# Altium footprint library amirlib.PcbLib: 456 footprints (part 3 of 29)
Each footprint in its own frame and in the unit in brackets; x right, y up, seen from the top. Pads: shape width x height; smd on the part's side, far side on the other; paste and mask are expansions set on the pad; w line width, h text height; cw(c..) or ccw(c..) is an arc to the next point about the centre after c.
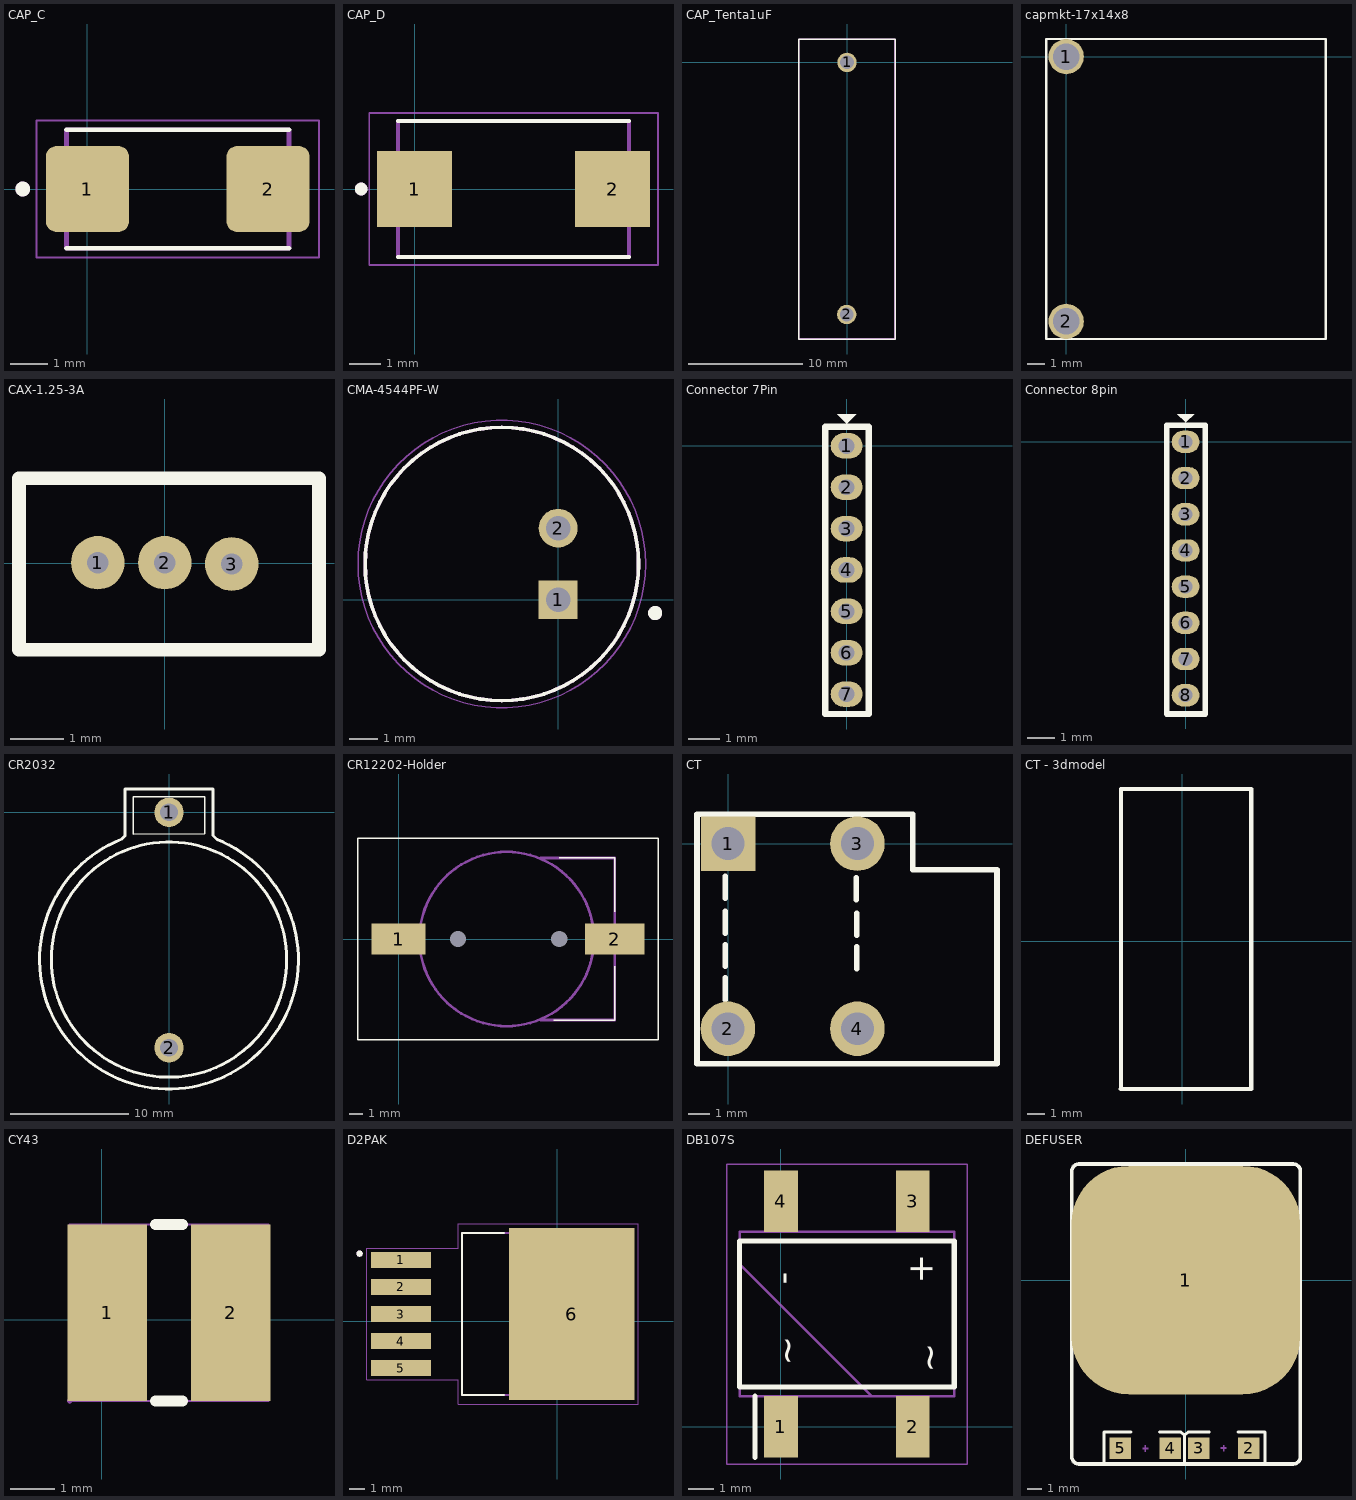
[diagram p2: the footprints below, top view; thin cyan lines are the x and y axes]

## CAP_C [mm]
pads (2):
  rrect25% 2.24x2.32 smd: 1(0,0) 2(4.87,0)
Top Overlay:
  circle w0.2: c-1.745,0 r0.1
  lines w0.127: -0.565,-1.6 5.435,-1.6 ; -0.565,1.6 5.435,1.6
Mechanical 13:
  circle w0.2: c-1.745,0 r0.1
  lines w0.127: -0.565,-1.6 -0.565,1.6 5.435,1.6 5.435,-1.6 -0.565,-1.6
Mechanical 15:
  lines w0.05: -1.375,-1.85 -1.37,1.85 6.245,1.85 6.245,-1.85 -1.375,-1.85
3D body "TAJC107K010RNJ--3DModel-STEP-269445.STEP": height 2.8, standoff 0, extent -0.565,-1.473 5.435,1.727

## CAP_D [mm]
pads (2):
  rect 2.37x2.41 smd: 1(0,0) 2(6.25,0)
Top Overlay:
  circle w0.2: c-1.685,0 r0.1
  lines w0.127: -0.525,-2.15 6.775,-2.15 ; -0.525,2.15 6.775,2.15
Mechanical 13:
  circle w0.2: c-1.685,0 r0.1
  lines w0.127: -0.525,-2.15 6.775,-2.15 6.775,2.15 -0.525,2.15 -0.525,-2.15
Mechanical 15:
  lines w0.05: -1.435,-2.4 7.685,-2.4 7.685,2.4 -1.435,2.4 -1.435,-2.4
3D body "step_temp.STEP": height 3.1, standoff 0, extent -0.525,-2.15 6.775,2.15

## CAP_Tenta1uF [mm]
pads (2):
  round 1.7 hole 1.2 mask+0.2: 1(0,0) 2(-0.025,-22.1)
Top Overlay:
  lines w0.127: -4.238,-24.25 -4.238,2.05 4.237,2.05 4.237,-24.25 -4.238,-24.25
Mechanical 13:
  lines w0.127: -4.238,-24.25 -4.238,2.05 4.237,2.05 4.237,-24.25 -4.238,-24.25
Mechanical 15:
  lines w0.05: -4.188,-24.175 4.187,-24.175 4.187,2.05 -4.188,2.05 -4.188,-24.175
3D body "MKT Film Capacitor body 26,5x10x18,5mm.SLDPRT": height 13.49, standoff -7.51, extent -4.15,-24.159 4.15,2.05

## capmkt-17x14x8 [mm]
pads (2):
  round 2 hole 1.5 mask+0.2: 1(0,0) 2(0,-15)
Top Overlay:
  lines w0.127: -1.125,-16 14.7,-16 14.7,1 -1.125,1 -1.125,-16
3D body "User Library-MKT(15_17x18x7).STEP": height 7.5, standoff 0.49, extent -0.8,-16.45 14.7,1.55

## CAX-1.25-3A [mm]
pads (3):
  round 1 hole 0.4: 1(-1.25,0.013) 2(0,0.013) 3(1.25,-0.013)
Top Overlay:
  lines w0.254: -2.722,-1.613 -2.722,1.587 2.878,1.587 2.878,-1.613 -2.722,-1.613

## CMA-4544PF-W [mm]
pads (2):
  rect 1.378x1.378 / inner round 1.378 / far side rect 1.378x1.378 hole 0.87: 1(0,0)
  round 1.378 hole 0.87: 2(0,2.54)
Top Overlay:
  circle w0.127: c-2,1.27 r4.85
  circle w0.3: c3.443,-0.471 r0.1
Mechanical 13:
  circle w0.127: c-2,1.27 r4.85
  circle w0.3: c3.443,-0.471 r0.1
Mechanical 15:
  circle w0.05: c-2,1.27 r5.1
3D body "step_temp.STEP": height 4.7, standoff -4.5, extent -6.85,-3.58 2.85,6.12

## Connector 7Pin [mm]
pads (7):
  oval 1x0.8 hole 0.5 mask+0.05: 1(0,0) 2(0,-1.3) 3(0,-2.6) 4(0,-3.9) 5(0,-5.2) 6(0,-6.5) 7(0,-7.8)
Top Overlay:
  region: 0,0.7 0.3,1 -0.3,1
  lines w0.2: -0.675,-8.425 -0.675,0.6 0.7,0.6 0.7,-8.425 -0.675,-8.425

## Connector 8pin [mm]
pads (8):
  oval 1x0.8 hole 0.5 mask+0.05: 1(0,0) 2(0,-1.3) 3(0,-2.6) 4(0,-3.9) 5(0,-5.2) 6(0,-6.5) 7(0,-7.8) 8(0,-9.1)
Top Overlay:
  region: 0,0.7 0.3,1 -0.3,1
  lines w0.2: -0.675,-9.775 -0.675,0.6 0.7,0.6 0.7,-9.775 -0.675,-9.775

## CR2032 [mm]
pads (2):
  round 2.5 hole 1.5: 1(0,0) 2(0,-20)
Top Overlay:
  circle w0.254: c0,-12.511 r10
  lines w0.127: -3.053,-1.851 -3.029,1.332 3.048,1.332 3.048,-1.834 -3.053,-1.851
  lines w0.254: -4.042,-2.281 ccw(c0,-12.511) 4.085,-2.298 3.75,-1.963 3.75,1.989 -3.75,1.989 -3.75,-1.989 -4.042,-2.281
3D body "LIR2032.stp": height 9.24, standoff -2.66, extent -11.05,-23.168 11.05,1.332

## CR12202-Holder [mm]
pads (4):
  rect 4x2.3 smd: 1(0,0)
  rect 4.4x2.3 smd: 2(16,0)
  round 0.6 hole 1.2 unplated: MH1(4.4,0) MH2(11.9,0)
Top Overlay:
  lines w0.1: 11.5,-6 16,-6 16,-2 ; 11.9,6 16,6 16,2 ; -3,-7.45 19.2,-7.45 19.2,7.45 -3,7.45 -3,-7.45
Mechanical 15:
  lines w0.2: 10.5,-6 16,-6 16,6 10.5,6 ; 8,-6.45 ccw(c8,0) 8,6.45 ccw(c8,0) 8,-6.45
3D body "CR1220-2.stp": height 4, standoff -0.7, extent -1.8,-7.432 17.9,7.432

## CT [mm]
pads (4):
  rect 2.5x2.5 hole 1.5: 1(0,0)
  round 2.5 hole 1.5: 2(-0.007,-8.484) 3(5.925,0) 4(5.925,-8.484)
Top Overlay:
  lines w0.254: -0.132,-7.151 -0.132,-6.151 ; -0.132,-5.626 -0.132,-4.626 ; -0.132,-4.101 -0.132,-3.101 ; -0.132,-2.501 -0.132,-1.501 ; 5.867,-2.565 5.867,-1.565 ; 5.893,-5.724 5.893,-4.724 ; 5.893,-4.191 5.893,-3.191 ; -1.425,-10.09 -1.425,1.35 8.45,1.35 8.45,-1.2 9.7,-1.2 12.319,-1.2 12.319,-10.09 7,-10.09 2.86,-10.09 -1.425,-10.09

## CT - 3dmodel [mm]
Top Overlay:
  lines w0.254: -3.5,-8.4 3.95,-8.4 3.95,8.675 -3.475,8.675 -3.475,-8.4
3D body "Part8.STEP": height 19.45, standoff 0.51, extent -3.275,-8.323 3.825,8.573

## CY43 [mil]
pads (2):
  rect 70.9x157.5 smd: 1(4.8,6.2) 2(115.1,6.2)
Top Overlay:
  lines w10: 48.1,-72.6 71.7,-72.6 ; 48.1,84.9 71.7,84.9
Mechanical 6:
  lines w2: -28.6,-72.6 -28.6,84.9 148.5,84.9 148.5,-72.6 -28.6,-72.6
Mechanical 8:
  region: -26.3,-72.6 -26.7,-73.9 -27.7,-74.8 -29,-75 -30.2,-74.4 -30.9,-73.3 -30.9,-72 -30.2,-70.9 -29,-70.3 -27.7,-70.5 -26.7,-71.4
Mechanical 9:
  region: 83.8,84.9 83.8,-72.6 96.8,-72.6 105.4,-67.5 105.8,-67.1 114.1,-61.2 114.1,-60.8 121.9,-53.5 125.5,-48.9 128.3,-45.5 128.3,-45.1 134.2,-36.1 138.4,-26.7 141.5,-17.1 143.1,-10.2 144,-6 144.1,-5.3 143.6,-4.4 143.3,-3.3 142.1,-2.2 140.9,-1.8 135.8,-1.8 135,-1.4 133.4,0.2 133,1 133,2.6 140.5,2.6 142.1,3.4 142.9,4.1 142.8,4.6 143.3,4.9 143.3,6.9 142.9,7.6 142.9,8.1 142.5,8.1 142.1,8.8 141.7,9.2 140.9,9.6 133,9.6 133,11.2 133.4,12 135,13.6 135.8,14 140.9,14 142.1,14.4 143.3,15.5 143.7,16.7 144.1,17.5 144,18.3 141.7,28.9 141.3,30.3 138.5,38.8 137.4,41.1 134.1,48.4 128.3,57.1 128.3,57.7 121.9,65.6 114.1,73 114.1,73.4 105.5,79.6 96.8,84.7 83.8,84.9
  region: 83.8,84.9
  region: 36.3,84.9 36.3,-72.6 23.3,-72.6 14.7,-67.5 14.3,-67.1 6,-61.1 6,-60.8 -1.7,-53.4 -5.4,-48.9 -8.2,-45.4 -8.2,-45 -14,-36 -18.3,-26.7 -21.4,-17 -23,-10.2 -23.9,-6 -23.9,-5.3 -23.5,-4.4 -23.1,-3.3 -21.9,-2.1 -20.8,-1.8 -15.7,-1.7 -14.9,-1.3 -13.3,0.2 -12.9,1 -12.9,2.6 -20.3,2.6 -21.9,3.4 -22.7,4.2 -22.7,4.6 -23.1,5 -23.1,6.9 -22.7,7.7 -22.7,8.1 -22.3,8.1 -22,8.9 -21.6,9.3 -20.8,9.7 -12.9,9.7 -12.9,11.3 -13.3,12.1 -14.8,13.6 -15.7,14.1 -20.7,14 -21.9,14.4 -23.1,15.6 -23.5,16.8 -23.9,17.6 -23.9,18.4 -21.5,29 -21.1,30.3 -18.4,38.8 -17.3,41.2 -14,48.4 -8.2,57.1 -8.1,57.7 -1.8,65.7 6,73.1 6,73.5 14.7,79.6 23.4,84.7 36.3,84.9
  region: 36.3,84.9

## D2PAK [mm]
pads (6):
  rect 3.79x0.99 smd: 1(-9.845,3.846) 2(-9.845,2.146) 3(-9.845,0.446) 4(-9.845,-1.254) 5(-9.845,-2.954)
  rect 7.88x10.84 smd paste-6: 6(0.905,0.446)
Top Overlay:
  circle w0.2: c-12.445,4.246 r0.1
  lines w0.127: -3.355,-4.634 -5.998,-4.634 -5.998,5.526 -3.355,5.526
Top Paste:
  region: 1.665,0.726 0.145,0.726 0.145,1.976 1.665,1.976
  region: -0.965,0.726 -2.485,0.726 -2.485,1.976 -0.965,1.976
  region: 4.295,0.726 2.775,0.726 2.775,1.976 4.295,1.976
  region: 1.665,2.536 0.145,2.536 0.145,3.786 1.665,3.786
  region: -0.965,2.536 -2.485,2.536 -2.485,3.786 -0.965,3.786
  region: 4.295,2.536 2.775,2.536 2.775,3.786 4.295,3.786
  region: 1.665,4.346 0.145,4.346 0.145,5.596 1.665,5.596
  region: -0.965,4.346 -2.485,4.346 -2.485,5.596 -0.965,5.596
  region: 4.295,4.346 2.775,4.346 2.775,5.596 4.295,5.596
  region: 1.665,-1.084 0.145,-1.084 0.145,0.166 1.665,0.166
  region: -0.965,-1.084 -2.485,-1.084 -2.485,0.166 -0.965,0.166
  region: 4.295,-1.084 2.775,-1.084 2.775,0.166 4.295,0.166
  region: 1.665,-2.894 0.145,-2.894 0.145,-1.644 1.665,-1.644
  region: -0.965,-2.894 -2.485,-2.894 -2.485,-1.644 -0.965,-1.644
  region: 4.295,-2.894 2.775,-2.894 2.775,-1.644 4.295,-1.644
  region: 1.665,-4.704 0.145,-4.704 0.145,-3.454 1.665,-3.454
  region: -0.965,-4.704 -2.485,-4.704 -2.485,-3.454 -0.965,-3.454
  region: 4.295,-4.704 2.775,-4.704 2.775,-3.454 4.295,-3.454
Mechanical 13:
  circle w0.2: c-12.445,4.246 r0.1
  lines w0.127: -5.998,-4.634 2.923,-4.634 2.923,5.526 -5.998,5.526 -5.998,-4.634
Mechanical 15:
  lines w0.05: -11.99,-3.699 -11.99,4.591 -6.248,4.591 -6.248,6.116 5.095,6.116 5.095,-5.224 -6.248,-5.224 -6.248,-3.699 -11.99,-3.699
3D body "step_temp.STEP": height 4.65, standoff -0.15, extent -10.62,-4.634 3.731,5.526

## DB107S [mm]
pads (4):
  rect 1.3x2.375 smd: 1(0,0) 2(5.1,0) 3(5.1,8.724) 4(0,8.724)
Top Overlay:
  lines w0.2: -1,-1.188 -1,1.187 ; -1.6,1.537 -1.6,7.187 6.7,7.187 6.7,1.537 -1.6,1.537
  text "-" at 0.55,5.487 h1
  text "+" at 5.867,5.537 h1
  text "~" at 6.208,2.087 h1
  text "~" at 0.708,2.362 h1
Mechanical 13:
  lines w0.1: -1.6,6.287 3.5,1.187 ; -1.6,1.187 -1.6,7.537 6.7,7.537 6.7,1.187 -1.6,1.187
Mechanical 15:
  lines w0.05: -2.1,-1.438 -2.1,10.162 7.2,10.162 7.2,-1.438 -2.1,-1.438
3D body "DB107S.stp": height 3.4, standoff 0, extent -1.6,-0.588 6.7,9.312

## DEFUSER [mm]
pads (5):
  rrect50% 16x16 smd: 1(0,0)
  rect 1.5x1.5 smd: 2(4.388,-11.775) 3(0.887,-11.775) 4(-1.087,-11.775) 5(-4.588,-11.775)
Top Overlay:
  lines w0.2: -5.738,-12.84 -5.738,-10.625 -3.837,-10.625 ; -1.837,-10.625 -0.388,-10.625 -0.103,-10.853 ; -0.103,-12.76 -0.103,-10.853 ; 1.638,-10.625 0.182,-10.625 -0.103,-10.853 ; 3.638,-10.625 5.538,-10.625 5.538,-12.865
  lines w0.254: -7.987,-12.375 ccw(c-7.488,-12.375) -7.488,-12.875 7.512,-12.875 ccw(c7.512,-12.375) 8.013,-12.375 8.013,7.625 ccw(c7.513,7.625) 7.513,8.125 -7.488,8.125 ccw(c-7.488,7.625) -7.987,7.625 -7.987,-12.375
Mechanical 1:
  lines w0.1: -3.037,-11.8 -2.637,-11.8 ; -3.037,-11.775 -2.637,-11.775 ; -2.837,-12 -2.837,-11.6 ; -2.837,-11.975 -2.837,-11.575 ; 2.438,-11.775 2.838,-11.775 ; 2.438,-11.75 2.838,-11.75 ; 2.638,-11.975 2.638,-11.575 ; 2.638,-11.95 2.638,-11.55
3D body "User Library-led_1206.STEP": height 1.1, standoff 0, extent -4.447,-12.575 -1.227,-10.975
3D body "SW3dPS-LED_SMD_SML010L_Red.STEP": height 1.36, standoff 0.01, extent 0.988,-12.463 4.288,-11.013
3D body: height 2.8, standoff 0, extent -7.987,-12.875 8.013,8.125